# Altium footprint library FootPrintLib_1.PcbLib: 498 footprints (part 1 of 35)
Each footprint in its own frame and in the unit in brackets; x right, y up, seen from the top. Pads: shape width x height; smd on the part's side, far side on the other; paste and mask are expansions set on the pad; w line width, h text height; cw(c..) or ccw(c..) is an arc to the next point about the centre after c.
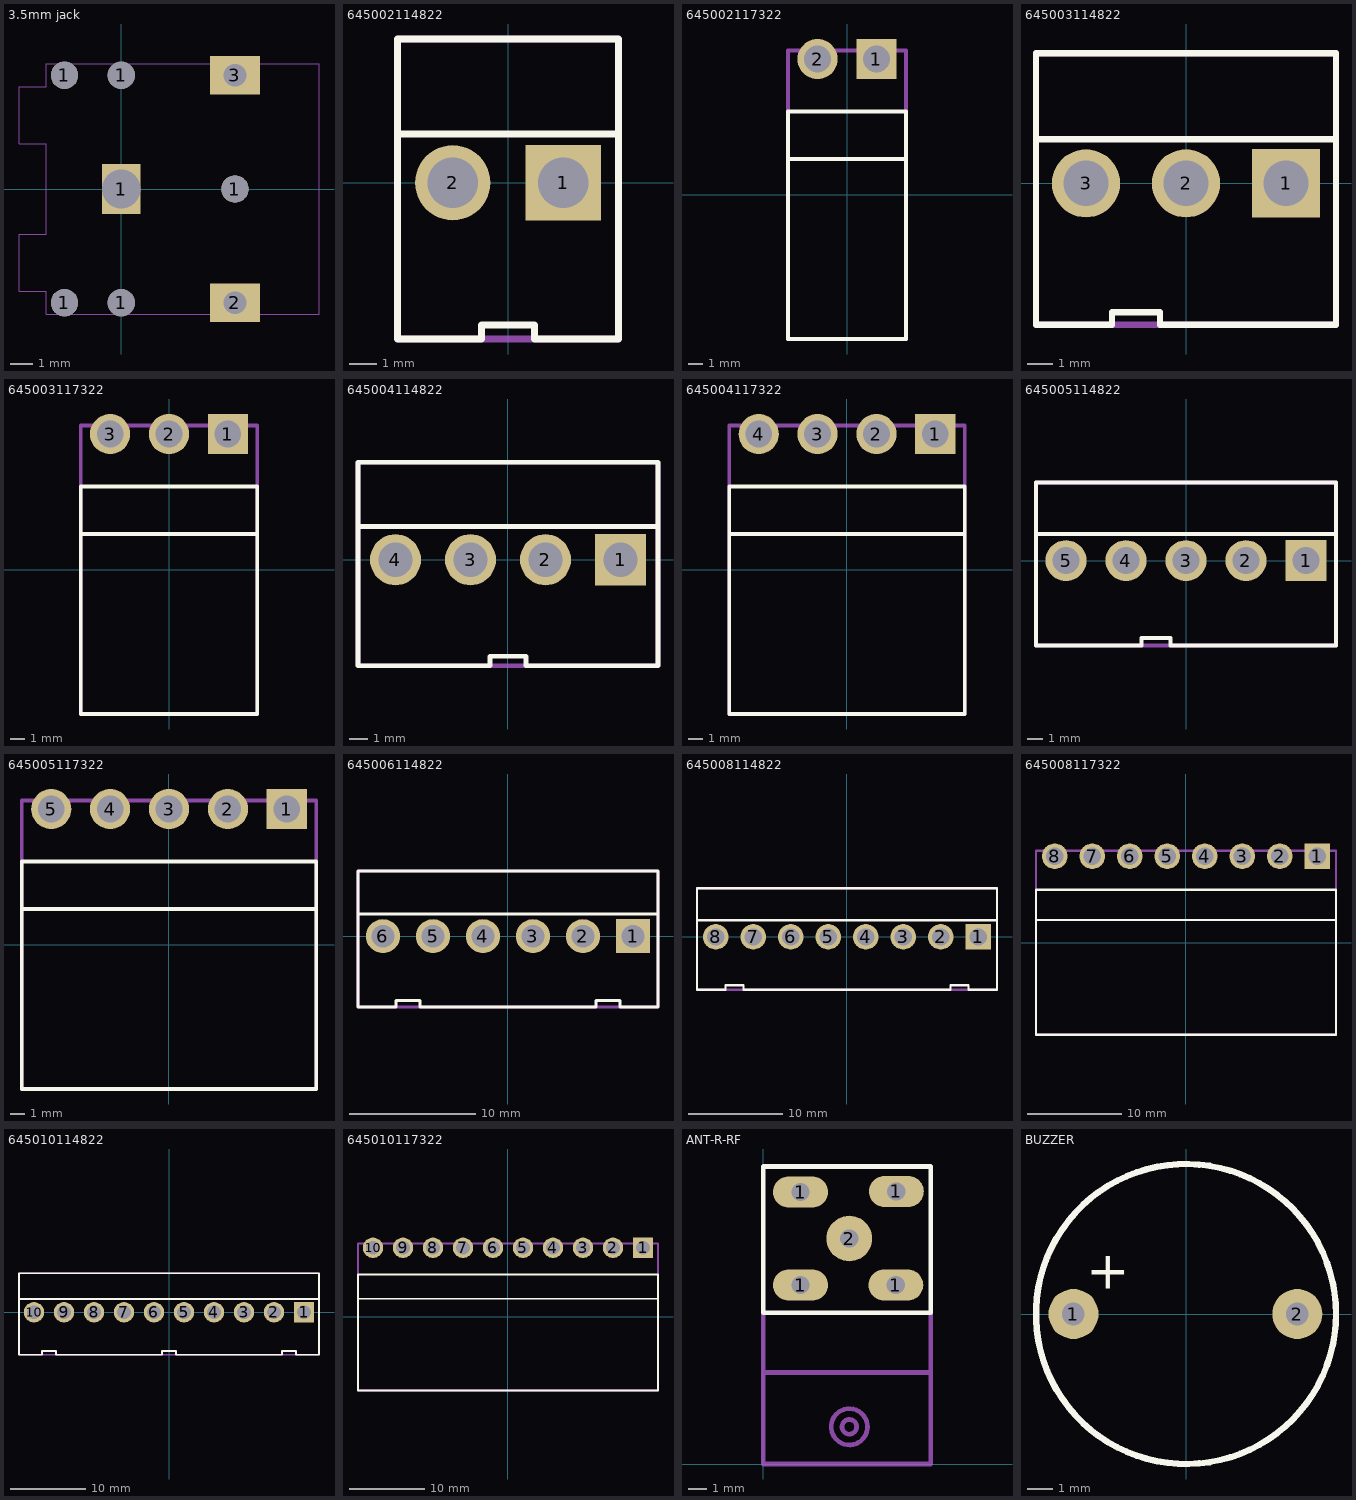
[diagram p0: the footprints below, top view; thin cyan lines are the x and y axes]

## 3.5mm jack [mm]
pads (8):
  round 1.2 hole 1.2 unplated: 1(-2.5,-5) 1(-2.5,5) 1(0,-5) 1(0,5) 1(5,0)
  rect 1.7x2.2 / inner rect 1.524x1.524 / far side rect 1.722x1.722 hole 1.7 square: 1(0,0)
  rect 2.2x1.7 / inner rect 1.524x1.524 / far side rect 1.722x1.722 hole 1 square: 2(5,-5) 3(5,5)
Mechanical 8:
  lines w0: -4.5,-4.5 -4.5,-2 -3.3,-2 -3.3,2 -4.5,2 -4.5,4.5 -3.3,4.5 -3.3,5.5 8.7,5.5 8.7,-5.5 -3.3,-5.5 -3.3,-4.5 -4.5,-4.5
3D body "CUI_SJ1-3523NG.step": height 6, standoff -2.8, extent -6.55,-6 7.5,6

## 645002114822 [mm] "3.96mm Male Locking Header, 2p"
height 13.85
pads (2):
  rect 2.7x2.7 hole 1.8: 1(1.98,0)
  round 2.7 hole 1.8: 2(-1.98,0)
Top Overlay:
  lines w0.254: -3.96,1.75 3.96,1.75 ; -3.96,-5.6 -0.95,-5.6 -0.95,-5.1 0.95,-5.1 0.95,-5.6 3.96,-5.6 3.96,5.15 -3.96,5.15 -3.96,-5.6
Mechanical 13:
  lines w0.254: -3.96,-5.6 3.96,-5.6 3.96,5.15 -3.96,5.15 -3.96,-5.6
3D body "645002114822.stp": height 13.95, standoff -3.5, extent -4.015,-5.6 4.015,5.15

## 645002117322 [mm] "3.96mm Male Right Angled Locking Header, 2p"
height 15.3
pads (2):
  rect 2.7x2.7 hole 1.8: 1(1.98,9.13)
  round 2.7 hole 1.8: 2(-1.98,9.13)
Top Overlay:
  lines w0.254: -3.96,2.4 3.96,2.4 ; -3.96,-9.7 -3.96,5.6 3.96,5.6 3.96,-9.7 -3.96,-9.7
Mechanical 13:
  lines w0.254: -3.96,-9.7 3.96,-9.7 3.96,9.7 -3.96,9.7 -3.96,-9.7
3D body "645002117322.stp": height 10.79, standoff -3.63, extent -4.015,-9.7 4.015,9.75

## 645003114822 [mm] "3.96mm Male Locking Header, 3p"
height 13.85
pads (3):
  rect 2.7x2.7 hole 1.8: 1(3.96,0)
  round 2.7 hole 1.8: 2(0,0) 3(-3.96,0)
Top Overlay:
  lines w0.254: -5.94,1.75 5.94,1.75 ; -5.94,-5.6 -2.93,-5.6 -2.93,-5.1 -1.03,-5.1 -1.03,-5.6 5.94,-5.6 5.94,5.15 -5.94,5.15 -5.94,-5.6
Mechanical 13:
  lines w0.254: -5.94,-5.6 5.94,-5.6 5.94,5.15 -5.94,5.15 -5.94,-5.6
3D body "645003114822.stp": height 13.95, standoff -3.5, extent -5.995,-5.6 5.995,5.15

## 645003117322 [mm] "3.96mm Male Right Angled Locking Header, 3p"
height 15.3
pads (3):
  rect 2.7x2.7 hole 1.8: 1(3.96,9.13)
  round 2.7 hole 1.8: 2(0,9.13) 3(-3.96,9.13)
Top Overlay:
  lines w0.254: -5.94,2.4 5.94,2.4 ; -5.94,-9.7 -5.94,5.6 5.94,5.6 5.94,-9.7 -5.94,-9.7
Mechanical 13:
  lines w0.254: -5.94,-9.7 5.94,-9.7 5.94,9.7 -5.94,9.7 -5.94,-9.7
3D body "645003117322.stp": height 10.79, standoff -3.63, extent -5.995,-9.75 5.995,9.7

## 645004114822 [mm] "3.96mm Male Locking Header, 4p"
height 13.85
pads (4):
  rect 2.7x2.7 hole 1.8: 1(5.94,0)
  round 2.7 hole 1.8: 2(1.98,0) 3(-1.98,0) 4(-5.94,0)
Top Overlay:
  lines w0.254: -7.92,1.75 7.92,1.75 ; -7.92,-5.6 -0.95,-5.6 -0.95,-5.1 0.95,-5.1 0.95,-5.6 7.92,-5.6 7.92,5.15 -7.92,5.15 -7.92,-5.6
Mechanical 13:
  lines w0.254: -7.92,-5.6 7.92,-5.6 7.92,5.15 -7.92,5.15 -7.92,-5.6
3D body "645004114822.stp": height 13.95, standoff -3.5, extent -7.975,-5.6 7.975,5.15

## 645004117322 [mm] "3.96mm Male Right Angled Locking Header, 4p"
height 15.3
pads (4):
  rect 2.7x2.7 hole 1.8: 1(5.94,9.13)
  round 2.7 hole 1.8: 2(1.98,9.13) 3(-1.98,9.13) 4(-5.94,9.13)
Top Overlay:
  lines w0.254: -7.92,2.4 7.92,2.4 ; -7.92,-9.7 7.92,-9.7 7.92,5.6 -7.92,5.6 -7.92,-9.7
Mechanical 13:
  lines w0.254: -7.92,-9.7 -7.92,9.7 7.92,9.7 7.92,-9.7 -7.92,-9.7
3D body "645004117322.stp": height 10.79, standoff -3.63, extent -7.975,-9.75 7.975,9.7

## 645005114822 [mm] "3.96mm Male Locking Header, 5p"
height 13.85
pads (5):
  rect 2.7x2.7 hole 1.8: 1(7.92,0)
  round 2.7 hole 1.8: 2(3.96,0) 3(0,0) 4(-3.96,0) 5(-7.92,0)
Top Overlay:
  lines w0.254: -9.9,1.75 9.9,1.75 ; -9.9,-5.6 -2.93,-5.6 -2.93,-5.1 -1.03,-5.1 -1.03,-5.6 9.9,-5.6 9.9,5.15 -9.9,5.15 -9.9,-5.6
Mechanical 13:
  lines w0.254: -9.9,-5.6 9.9,-5.6 9.9,5.15 -9.9,5.15 -9.9,-5.6
3D body "645005114822.stp": height 13.95, standoff -3.5, extent -9.955,-5.6 9.955,5.15

## 645005117322 [mm] "3.96mm Male Right Angled Locking Header, 5p"
height 15.3
pads (5):
  rect 2.7x2.7 hole 1.8: 1(7.92,9.13)
  round 2.7 hole 1.8: 2(3.96,9.13) 3(0,9.13) 4(-3.96,9.13) 5(-7.92,9.13)
Top Overlay:
  lines w0.254: -9.9,2.4 9.9,2.4 ; -9.9,-9.7 -9.9,5.6 9.9,5.6 9.9,-9.7 -9.9,-9.7
Mechanical 13:
  lines w0.254: -9.9,-9.7 9.9,-9.7 9.9,9.7 -9.9,9.7 -9.9,-9.7
3D body "645005117322.stp": height 10.79, standoff -3.63, extent -9.955,-9.75 9.955,9.7

## 645006114822 [mm] "3.96mm Male Locking Header, 6p"
height 13.85
pads (6):
  rect 2.7x2.7 hole 1.8: 1(9.9,0)
  round 2.7 hole 1.8: 2(5.94,0) 3(1.98,0) 4(-1.98,0) 5(-5.94,0) 6(-9.9,0)
Top Overlay:
  lines w0.254: -11.88,1.75 11.88,1.75 ; -11.88,-5.6 -8.87,-5.6 -8.87,-5.1 -6.97,-5.1 -6.97,-5.6 6.97,-5.6 6.97,-5.1 8.87,-5.1 8.87,-5.6 11.88,-5.6 11.88,5.15 -11.88,5.15 -11.88,-5.6
Mechanical 13:
  lines w0.254: -11.88,-5.6 11.88,-5.6 11.88,5.15 -11.88,5.15 -11.88,-5.6
3D body "645006114822.stp": height 13.95, standoff -3.5, extent -11.935,-5.6 11.935,5.15

## 645008114822 [mm] "3.96mm Male Locking Header, 8p"
height 13.85
pads (8):
  rect 2.7x2.7 hole 1.8: 1(13.86,0)
  round 2.7 hole 1.8: 2(9.9,0) 3(5.94,0) 4(1.98,0) 5(-1.98,0) 6(-5.94,0) 7(-9.9,0) 8(-13.86,0)
Top Overlay:
  lines w0.254: -15.84,1.75 15.84,1.75 ; -15.84,-5.6 -15.84,5.15 15.84,5.15 15.84,-5.6 12.83,-5.6 12.83,-5.1 10.93,-5.1 10.93,-5.6 -10.93,-5.6 -10.93,-5.1 -12.83,-5.1 -12.83,-5.6 -15.84,-5.6
Mechanical 13:
  lines w0.254: -15.84,-5.6 -15.84,5.15 15.84,5.15 15.84,-5.6 -15.84,-5.6
3D body "645008114822.stp": height 13.95, standoff -3.5, extent -15.895,-5.6 15.895,5.15

## 645008117322 [mm] "3.96mm Male Right Angled Locking Header, 8p"
height 15.3
pads (8):
  rect 2.7x2.7 hole 1.8: 1(13.86,9.13)
  round 2.7 hole 1.8: 2(9.9,9.13) 3(5.94,9.13) 4(1.98,9.13) 5(-1.98,9.13) 6(-5.94,9.13) 7(-9.9,9.13) 8(-13.86,9.13)
Top Overlay:
  lines w0.254: -15.84,2.4 15.84,2.4 ; -15.84,-9.7 -15.84,5.6 15.84,5.6 15.84,-9.7 -15.84,-9.7
Mechanical 13:
  lines w0.254: -15.84,-9.7 15.84,-9.7 15.84,9.7 -15.84,9.7 -15.84,-9.7
3D body "645008117322.stp": height 10.79, standoff -3.63, extent -15.895,-9.7 15.895,9.75

## 645010114822 [mm] "3.96mm Male Locking Header, 10p"
height 13.85
pads (10):
  rect 2.7x2.7 hole 1.8: 1(17.82,0)
  round 2.7 hole 1.8: 2(13.86,0) 3(9.9,0) 4(5.94,0) 5(1.98,0) 6(-1.98,0) 7(-5.94,0) 8(-9.9,0) 9(-13.86,0) 10(-17.82,0)
Top Overlay:
  lines w0.254: -19.8,1.75 19.8,1.75 ; -19.8,-5.6 -19.8,5.15 19.8,5.15 19.8,-5.6 16.79,-5.6 16.79,-5.1 14.89,-5.1 14.89,-5.6 0.95,-5.6 0.95,-5.1 -0.95,-5.1 -0.95,-5.6 -14.89,-5.6 -14.89,-5.1 -16.79,-5.1 -16.79,-5.6 -19.8,-5.6
Mechanical 13:
  lines w0.254: -19.8,-5.6 -19.8,5.15 19.8,5.15 19.8,-5.6 -19.8,-5.6
3D body "645010114822.stp": height 13.95, standoff -3.5, extent -19.855,-5.6 19.855,5.15

## 645010117322 [mm] "3.96mm Male Right Angled Locking Header, 10p"
height 15.3
pads (10):
  rect 2.7x2.7 hole 1.8: 1(17.82,9.13)
  round 2.7 hole 1.8: 2(13.86,9.13) 3(9.9,9.13) 4(5.94,9.13) 5(1.98,9.13) 6(-1.98,9.13) 7(-5.94,9.13) 8(-9.9,9.13) 9(-13.86,9.13) 10(-17.82,9.13)
Top Overlay:
  lines w0.254: -19.8,2.4 19.8,2.4 ; -19.8,-9.7 -19.8,5.6 19.8,5.6 19.8,-9.7 -19.8,-9.7
Mechanical 13:
  lines w0.254: -19.8,-9.7 19.8,-9.7 19.8,9.7 -19.8,9.7 -19.8,-9.7
3D body "645010117322.stp": height 10.79, standoff -3.55, extent -19.855,-9.7 19.855,9.7

## ANT-R-RF [mm] "Antenna; Right; RF;"
pads (5):
  oval 3x1.7 hole 1: 1(2.032,9.779) 1(2.032,14.859) 1(7.239,9.779) 1(7.27,14.89)
  round 2.5 hole 1: 2(4.699,12.319)
Top Overlay:
  lines w0.254: 0,8.255 0,16.256 9.144,16.256 9.144,8.255 0,8.255
Mechanical 1:
  circle w0.254: c4.699,2.032 r0.402
  circle w0.254: c4.699,2.032 r0.992
  lines w0.254: 0,5 9.144,5 ; 0,8.255 0,0 9.144,0 9.144,8.255

## BUZZER [mm] "BUZZER"
pads (2):
  round 2 hole 0.9: 1(-4.5,0) 2(4.45,0)
Top Overlay:
  circle w0.254: c0,0 r6
  text "+" at -4,1 h1.52